# Altium schematic symbol library 47µF_63V、低ESR铝电解_插件,D8xL11.5mm.SCHLIB: 1 symbol
Pins are listed as number, name and electrical type; pins without a type are passive.

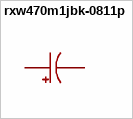
[diagram p0: symbol rxw470m1jbk-0811p]

## rxw470m1jbk-0811p
designator C??  (value not drawn)
容值:47uF;精度:±20%;额定电压:63V;纹波电流:405mA@100kHz;等效串联电阻(ESR):342mΩ@100kHz;; Manufacturer: Lelon(立隆); AddInBom: yes; ModelId: a2c936ec27754f809f3966430e36f767; ModelName: CAP-TH_D8.0-H8.0-P3.50; ModelTransform: 314.96,314.862,0,180,0,0,0,0,-137.795; Value: 47uF; Tolerance: ±20%; Voltage Rating: 63V; Pin Spacing: 3.5mm; Lifetime: 5000hrs@105℃; Symbol: RXW470M1JBK-0811P; LCSC Part Name: 47uF ±20% 63V; SupplierPart: C134656; ManufacturerPart: RXW470M1JBK-0811P; Supplier Footprint: 插件,D8xL11.5mm; JLCPCB Part Class: Extended Part; Datasheet: https://item.szlcsc.com/datasheet/RXW470M1JBK-0811P/145966.html; Supplier: LCSC; ConvertToPcb: yes; FootprintName: CAP-TH_BD8.0-P3.50-D0.6-FD; Ripple Current: 405mA@100kHz; Equivalent Series Resistance(ESR): 342mΩ@100kHz; Diameter: 8mm; Height - Seated (Max): 11.5mm
footprint CAP-TH_BD8.0-P3.50-D0.6-FD
pins: 1, 2